# Altium schematic symbol library Schlib1.SchLib: 14 symbols
Pins are listed as number, name and electrical type; pins without a type are passive.

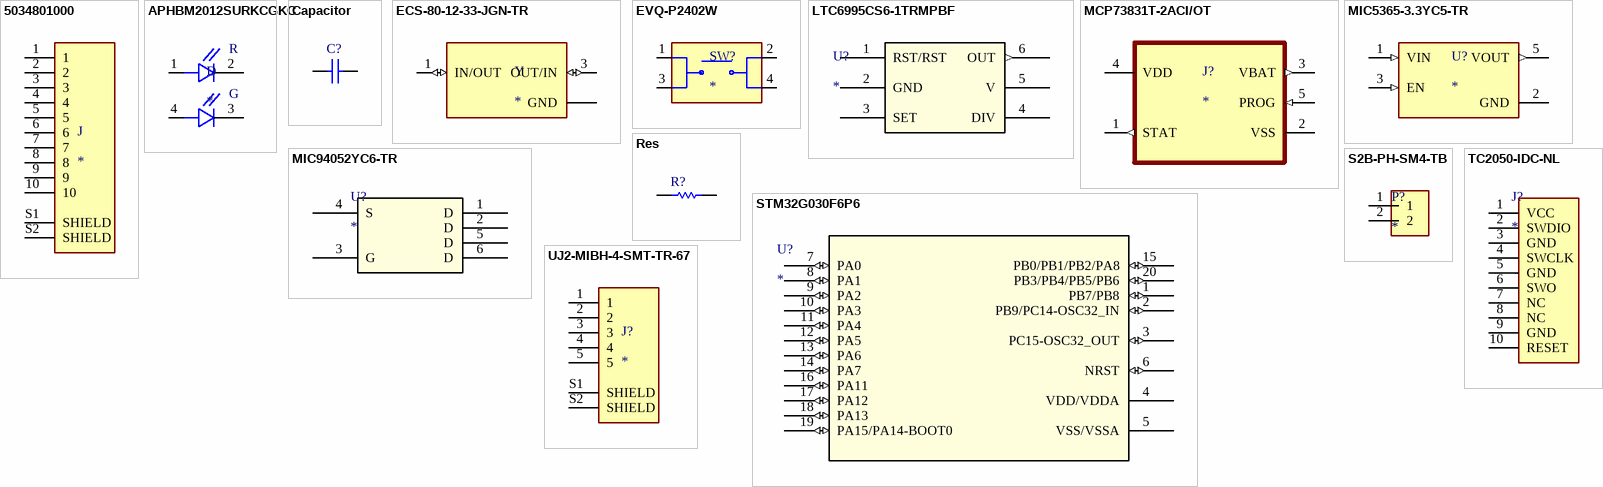
[diagram p0: symbols 5034801000 to UJ2-MIBH-4-SMT-TR-67]

## 5034801000
designator J
10 Position FFC, FPC Connector Contacts, Top and Bottom 0.020 _0.50mm_ Surface Mount, Right Angle; Part: 5034801000; Value: 10
footprint MOLEX_5034801000
pins: 1, 2, 3, 4, 5, 6, 7, 8, 9, 10, S1 SHIELD, S2 SHIELD

## APHBM2012SURKCGKC
designator D
Green, Red 570nm Green, 630nm Red LED Indication - Discrete 2.1V Green, 1.95V Red 0805 _2012 Metric_; Part: APHBM2012SURKCGKC; Value: GREEN/RED
footprint LED_APHBM2012SURKCGKC
pins: 1 A_R, 2 C_R, 3 C_G, 4 A_G
text: R; G

## Capacitor
designator C?
footprint CAP0201 (Chip Capacitor, 2-Leads, Body 0.6x0.3mm, IPC Medium Density)
footprint CAP0201 (Chip Capacitor, 2-Leads, Body 0.6x0.3mm, IPC Medium Density)
footprint CAP0603 (Chip Capacitor, 2-Leads, Body 1.6x0.8mm, IPC High Density)
footprint CAP0805 (Chip Capacitor, 2-Leads, Body 2.0x1.3mm, IPC High Density)
footprint CAP1206 (Chip Capacitor, 2-Leads, Body 3.2x1.6mm, IPC High Density)
pins: 1, 2

## ECS-80-12-33-JGN-TR
designator Y
8MHz Â±20ppm Crystal 12pF 400 Ohms 4-SMD, No Lead; MF: ECS-80-12-33-JGN-TR; Value: 8 MHz
footprint XTAL_ECS-240-8-33-AGN-TR
pins: 1 IN/OUT (io), 2 GND (power), 3 OUT/IN (io), 4 GND (power)

## EVQ-P2402W
designator SW?
SWITCH TACTILE SPST-NO 0.02A 15V; Part: EVQ-P2402W; Value: *
footprint SW_EVQ-P2402W
pins: 1, 2, 3, 4

## LTC6995CS6-1TRMPBF
designator U?
IC OSC SILICON PROG TSOT23-6; Mfr_Name: LTC6995CS6-1#TRMPBF; RefDes: LTC6995CS6-1#TRMPBF; Type: Type
footprint TSOT-23-6_1P625X2P9_ADI
pins: 1 RST/RST, 2 GND (power), 3 SET, 4 DIV, 5 V, 6 OUT (out)

## MCP73831T-2ACI/OT
designator J?
Charger IC Lithium Ion/Polymer SOT-23-5; Part: MCP73831T-2ACI/OT; Value: MCP73831T-2ACI/OT
footprint SOT95P280X145-5N
pins: 1 STAT (out), 2 VSS (power), 3 VBAT (out), 4 VDD (power), 5 PROG (in)

## MIC5365-3.3YC5-TR
designator U?
Linear Voltage Regulator IC 1 Output 150mA SC-70-5; Value: 3V3 LDO; MP: MIC5365-3.3YC5-TR
footprint SOT65P210X110-5N
pins: 1 VIN (in), 2 GND (power), 3 EN (in), 5 VOUT (out)

## MIC94052YC6-TR
designator U?
MOSFET P-CH 6V 2A SC70-6; Part: MOSFET P-CH 6V 2A SC70-6; Value: MOSFET P-CH 6V 2A SC70-6
footprint SC70-6_MC_MCH
footprint SC70-6_MC_MCH
pins: 1 D, 2 D, 3 G, 4 S, 5 D, 6 D

## Res
designator R?
footprint RES_0201 (Chip Resistor, 2-Leads, Body 0.6x0.3mm, IPC Medium Density)
footprint RES_0402 (Chip Resistor, 2-Leads, Body 1.0x0.5mm, IPC Medium Density)
footprint RES_0603 (Chip Resistor, 2-Leads, Body 1.6x0.8mm, IPC Medium Density)
footprint RES_0805 (Chip Resistor, 2-Leads, Body 1.9x1.3mm, IPC Medium Density)
footprint RES_1206 (Chip Resistor, 2-Leads, Body 3.3x1.6mm, IPC Medium Density)
pins: 1, 2

## S2B-PH-SM4-TB
designator P?
Connector Header Surface Mount, Right Angle 2 position 0.079 (2.00mm); Part: S2B-PH-SM4-TB; Value: S2B-PH-SM4-TB
footprint JST_S2B-PH-SM4-TB
pins: 1, 2

## STM32G030F6P6
designator U?
No Description Available; Part: STM32G030F6P6; Value: STM32G030F6P6
footprint TSSOP20
footprint TSSOP20
pins: 1 PB7/PB8 (io), 2 PB9/PC14-OSC32_IN (io), 3 PC15-OSC32_OUT (io), 4 VDD/VDDA (power), 5 VSS/VSSA (power), 6 NRST (io), 7 PA0 (io), 8 PA1 (io), 9 PA2 (io), 10 PA3 (io), 11 PA4 (io), 12 PA5 (io), 13 PA6 (io), 14 PA7 (io), 15 PB0/PB1/PB2/PA8 (io), 16 PA11 (io), 17 PA12 (io), 18 PA13 (io), 19 PA15/PA14-BOOT0 (io), 20 PB3/PB4/PB5/PB6 (io)

## TC2050-IDC-NL
designator J?
MSP-FET430 Flash Emulation Tool Plug-Of-Nailsâ„¢ Adapter Cable; Part: TC2050-IDC-NL; Value: NC
footprint TAG-CONNECT_TC2050-IDC-NL
pins: 1 VCC, 2 SWDIO, 3 GND, 4 SWCLK, 5 GND, 6 SWO, 7 NC, 8 NC, 9 GND, 10 RESET

## UJ2-MIBH-4-SMT-TR-67
designator J?
Micro B, USB 2.0, 1.8 A, Right Angle, Surface Mount (SMT), Waterproof, USB Receptacle; Part: UJ2-MIBH-4-SMT-TR-67; Value: USB 2.0
footprint CUI_UJ2-MIBH-4-SMT-TR-67
pins: 1, 2, 3, 4, 5, S1 SHIELD, S2 SHIELD